# Altium footprint library 2171830001.PcbLib: 1 footprints
Each footprint in its own frame and in the unit in brackets; x right, y up, seen from the top. Pads: shape width x height; smd on the part's side, far side on the other; paste and mask are expansions set on the pad; w line width, h text height; cw(c..) or ccw(c..) is an arc to the next point about the centre after c.
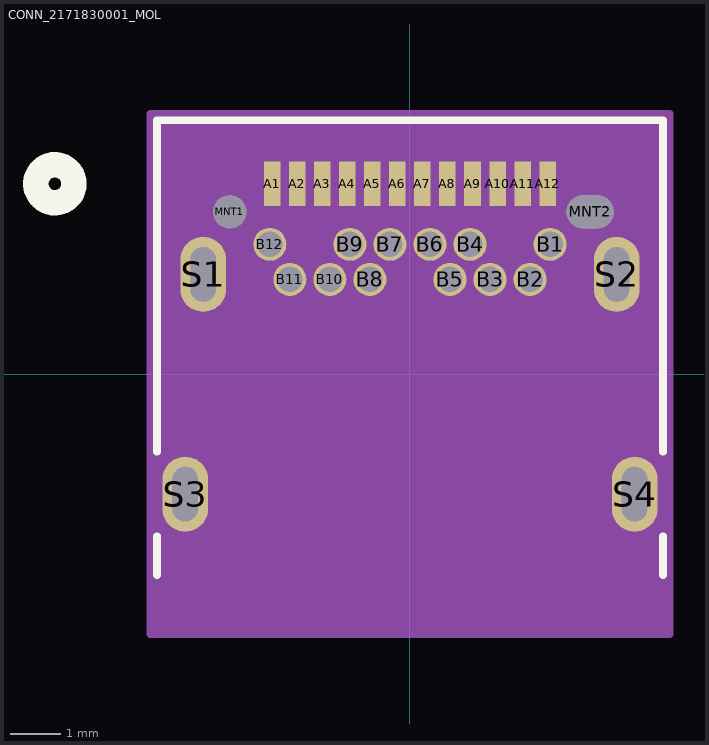
[diagram p0: the footprint, top view; thin cyan lines are the x and y axes]

## CONN_2171830001_MOL [mil]
pads (30):
  rect 13x35 smd paste+0 mask+0: A1(-108.27,149.62) A2(-88.58,149.62) A3(-68.9,149.62) A4(-49.21,149.62) A5(-29.53,149.62) A6(-9.84,149.62) A7(9.84,149.62) A8(29.53,149.62) A9(49.21,149.62) A10(68.9,149.62) A11(88.58,149.62) A12(108.27,149.62)
  round 26 hole 20 paste-99999 mask+0: B1(110.24,101.98) B2(94.49,74.42) B3(62.99,74.42) B4(47.24,101.98) B5(31.5,74.42) B6(15.75,101.98) B7(-15.75,101.98) B8(-31.5,74.42) B9(-47.24,101.98) B10(-62.99,74.42) B11(-94.49,74.42) B12(-110.24,101.98)
  round 26 hole 26 unplated paste-99999 mask+0: MNT1(-141.73,127.57)
  oval 37x26 hole 26 slot 37 at 0 deg paste-99999 mask-18.5: MNT2(141.73,127.57)
  oval 36x59 hole 20 slot 43 at 90 deg paste-99999 mask+0: S1(-162.6,78.36) S2(162.6,78.36) S3(-176.77,-94.48) S4(176.77,-94.48)
Top Overlay:
  circle w20: c-279.27,149.62 r15
  lines w6: -199,-158.15 -199,-127.73 ; -199,-61.23 -199,199.5 199,199.5 199,-61.23 ; 199,-158.15 199,-127.73
Bottom Overlay:
  circle w20: c-279.27,149.62 r15
Mechanical 13:
  circle w20: c-108.27,149.62 r15
  lines w1: -194,-194.5 -194,194.5 194,194.5 194,-194.5 -194,-194.5
Mechanical 15:
  region: 204.27,204.5 -204.27,204.5 -204.27,-204.5 204.27,-204.5
  lines w6: -204.27,-204.5 204.27,-204.5 204.27,204.5 -204.27,204.5 -204.27,-204.5
Multi-Layer:
  lines w1: -204.27,-171.25 204.27,-171.25